# Altium footprint library header.PcbLib: 139 footprints (part 7 of 9)
Each footprint in its own frame and in the unit in brackets; x right, y up, seen from the top. Pads: shape width x height; smd on the part's side, far side on the other; paste and mask are expansions set on the pad; w line width, h text height; cw(c..) or ccw(c..) is an arc to the next point about the centre after c.
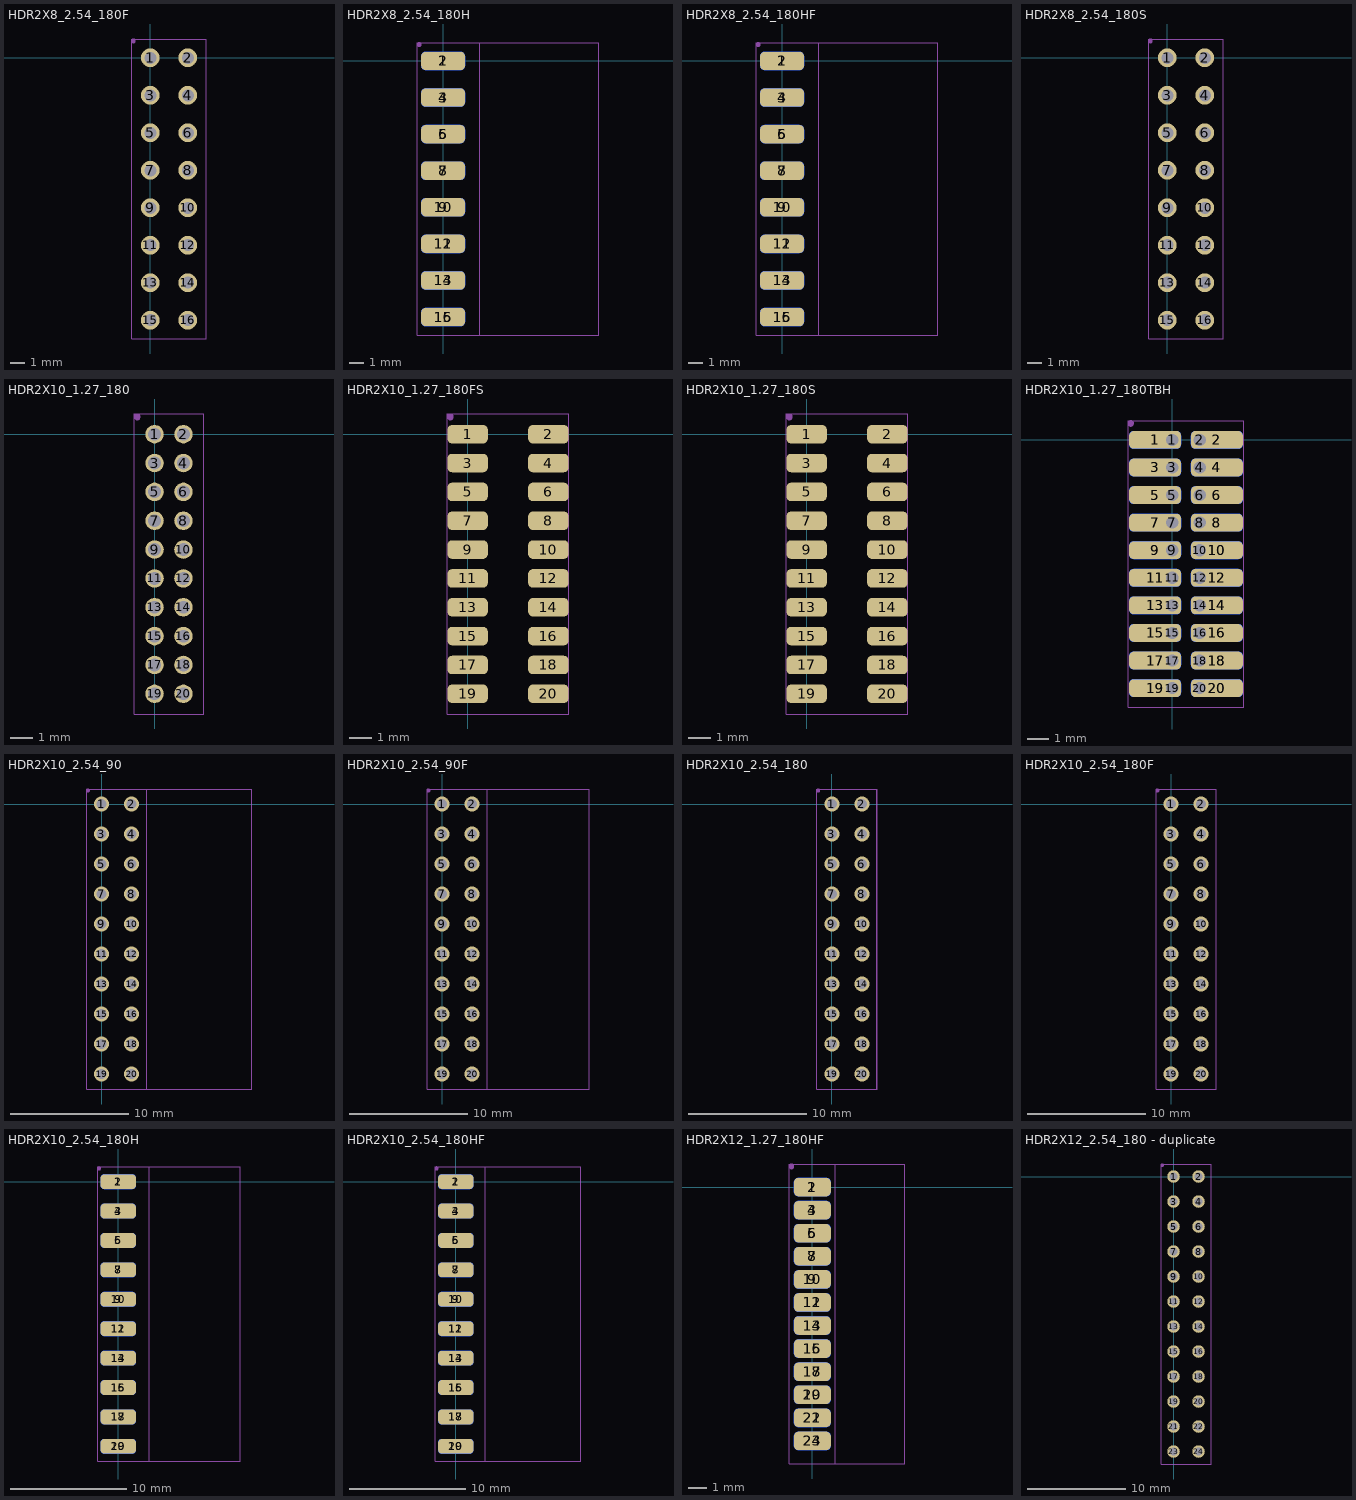
[diagram p6: the footprints below, top view; thin cyan lines are the x and y axes]

## HDR2X8_2.54_180F [mil]
height 169.29
pads (16):
  round 50 hole 32: 1(0,0) 2(100,0) 3(0,-100) 4(100,-100) 5(0,-200) 6(100,-200) 7(0,-300) 8(100,-300) 9(0,-400) 10(100,-400) 11(0,-500) 12(100,-500) 13(0,-600) 14(100,-600) 15(0,-700) 16(100,-700)
Mechanical 13:
  lines w2: -50,-750 -50,50 150,50 150,-750 -50,-750
Top Component (Mech14):
  circle w2: c-45,45 r5
  region: -45,40 -45.99,40 -47.83,40.76 -49.24,42.17 -50,44.01 -50,45 -50,45.99 -49.24,47.83 -47.83,49.24 -45.99,50 -45,50 -44.01,50 -42.17,49.24 -40.76,47.83 -40,45.99 -40,45 -40,44.01 -40.76,42.17 -42.17,40.76 -44.01,40
  lines w2: -50,-750 -50,50 150,50 150,-750 -50,-750
  text ".Designator" at 19,-370 h80
3D body "female_header_a-bl254-dg-g16d.stp": height 334.65, standoff -125.98, extent -48.42,-754.92 148.43,54.93

## HDR2X8_2.54_180H [mil]
height 169.29
pads (16):
  rrect50% 120x50 smd: 1(0,0) 3(0,-100) 5(0,-200) 7(0,-300) 9(0,-400) 11(0,-500) 13(0,-600) 15(0,-700)
  rrect50% 120x50 smd far side: 2(0,0) 4(0,-100) 6(0,-200) 8(0,-300) 10(0,-400) 12(0,-500) 14(0,-600) 16(0,-700)
Mechanical 13:
  lines w2: -70,-750 -70,50 425,50 425,-750 -70,-750
Top Component (Mech14):
  circle w2: c-65,45 r5
  region: -65,40 -65.99,40 -67.83,40.76 -69.24,42.17 -70,44.01 -70,45 -70,45.99 -69.24,47.83 -67.83,49.24 -65.99,50 -65,50 -64.01,50 -62.17,49.24 -60.76,47.83 -60,45.99 -60,45 -60,44.01 -60.76,42.17 -62.17,40.76 -64.01,40
  lines w2: -70,-750 100,-750 100,50 -70,50 -70,-750
  text ".Designator" at -26,-370 h80
Bottom Component (Mech15):
  lines w2: -70,-750 100,-750 100,50 -70,50 -70,-750
3D body "pin_header_awl254-dg-g16d.stp": height 78, standoff -122, extent -38.11,-749.99 414.65,50.01

## HDR2X8_2.54_180HF [mil]
height 169.29
pads (16):
  rrect50% 120x50 smd: 1(0,0) 3(0,-100) 5(0,-200) 7(0,-300) 9(0,-400) 11(0,-500) 13(0,-600) 15(0,-700)
  rrect50% 120x50 smd far side: 2(0,0) 4(0,-100) 6(0,-200) 8(0,-300) 10(0,-400) 12(0,-500) 14(0,-600) 16(0,-700)
Mechanical 13:
  lines w2: -70,-750 425,-750 425,50 -70,50 -70,-750
Top Component (Mech14):
  circle w2: c-65,45 r5
  region: -65,40 -65.99,40 -67.83,40.76 -69.24,42.17 -70,44.01 -70,45 -70,45.99 -69.24,47.83 -67.83,49.24 -65.99,50 -65,50 -64.01,50 -62.17,49.24 -60.76,47.83 -60,45.99 -60,45 -60,44.01 -60.76,42.17 -62.17,40.76 -64.01,40
  lines w2: -70,-750 -70,50 100,50 100,-750 -70,-750
  text ".Designator" at -31,-370 h80
Bottom Component (Mech15):
  lines w2: -70,-750 -70,50 100,50 100,-750 -70,-750
3D body "female_header_a-bl254-dg-g16d.stp": height 76.43, standoff -120.43, extent -35.98,-754.92 424.65,54.92

## HDR2X8_2.54_180S [mil]
height 169.29
pads (16):
  round 50 hole 32: 1(0,0) 2(100,0) 3(0,-100) 4(100,-100) 5(0,-200) 6(100,-200) 7(0,-300) 8(100,-300) 9(0,-400) 10(100,-400) 11(0,-500) 12(100,-500) 13(0,-600) 14(100,-600) 15(0,-700) 16(100,-700)
Mechanical 13:
  lines w2: -50,-750 150,-750 150,50 -50,50 -50,-750
Top Component (Mech14):
  circle w2: c-45,45 r5
  region: -45,40 -45.99,40 -47.83,40.76 -49.24,42.17 -50,44.01 -50,45 -50,45.99 -49.24,47.83 -47.83,49.24 -45.99,50 -45,50 -44.01,50 -42.17,49.24 -40.76,47.83 -40,45.99 -40,45 -40,44.01 -40.76,42.17 -42.17,40.76 -44.01,40
  lines w2: -50,-750 150,-750 150,50 -50,50 -50,-750
  text ".Designator" at 19,-370 h80
3D body "pin_header_a-sl254-dg-g16mp1.stp": height 334.71, standoff -48.82, extent -97.64,-750 197.64,50

## HDR2X10_1.27_180 [mil]
height 169.29
pads (20):
  round 32 hole 22: 1(0,0) 2(50,0) 3(0,-50) 4(50,-50) 5(0,-100) 6(50,-100) 7(0,-150) 8(50,-150) 9(0,-200) 10(50,-200) 11(0,-250) 12(50,-250) 13(0,-300) 14(50,-300) 15(0,-350) 16(50,-350) 17(0,-400) 18(50,-400) 19(0,-450) 20(50,-450)
Mechanical 13:
  lines w2: -35,-485 -35,35 85,35 85,-485 -35,-485
Top Component (Mech14):
  circle w2: c-30,30 r5
  region: -30,25 -30.99,25 -32.83,25.76 -34.24,27.17 -35,29.01 -35,30 -35,30.99 -34.24,32.83 -32.83,34.24 -30.99,35 -30,35 -29.01,35 -27.17,34.24 -25.76,32.83 -25,30.99 -25,30 -25,29.01 -25.76,27.17 -27.17,25.76 -29.01,25
  lines w2: -35,-485 85,-485 85,35 -35,35 -35,-485
  text ".Designator" at -1,-245 h80

## HDR2X10_1.27_180FS [mil]
height 169.29
pads (20):
  rrect50% 70x32 smd: 1(0,0) 2(140,0) 3(0,-50) 4(140,-50) 5(0,-100) 6(140,-100) 7(0,-150) 8(140,-150) 9(0,-200) 10(140,-200) 11(0,-250) 12(140,-250) 13(0,-300) 14(140,-300) 15(0,-350) 16(140,-350) 17(0,-400) 18(140,-400) 19(0,-450) 20(140,-450)
Mechanical 13:
  lines w2: -35,-485 -35,35 175,35 175,-485 -35,-485
Top Component (Mech14):
  circle w2: c-30,30 r5
  region: -30,25 -30.99,25 -32.83,25.76 -34.24,27.17 -35,29.01 -35,30 -35,30.99 -34.24,32.83 -32.83,34.24 -30.99,35 -30,35 -29.01,35 -27.17,34.24 -25.76,32.83 -25,30.99 -25,30 -25,29.01 -25.76,27.17 -27.17,25.76 -29.01,25
  lines w2: -35,-485 -35,35 175,35 175,-485 -35,-485
  text ".Designator" at 44,-245 h80
3D body "female_header_a-bl127-dg-g20mp1.stp": height 185.29, standoff 8.13, extent -20.54,-482.88 160.56,32.87

## HDR2X10_1.27_180S [mil]
height 169.29
pads (20):
  rrect50% 70x32 smd: 1(0,0) 2(140,0) 3(0,-50) 4(140,-50) 5(0,-100) 6(140,-100) 7(0,-150) 8(140,-150) 9(0,-200) 10(140,-200) 11(0,-250) 12(140,-250) 13(0,-300) 14(140,-300) 15(0,-350) 16(140,-350) 17(0,-400) 18(140,-400) 19(0,-450) 20(140,-450)
Mechanical 13:
  lines w2: -35,-485 175,-485 175,35 -35,35 -35,-485
Top Component (Mech14):
  circle w2: c-30,30 r5
  region: -30,25 -30.99,25 -32.83,25.76 -34.24,27.17 -35,29.01 -35,30 -35,30.99 -34.24,32.83 -32.83,34.24 -30.99,35 -30,35 -29.01,35 -27.17,34.24 -25.76,32.83 -25,30.99 -25,30 -25,29.01 -25.76,27.17 -27.17,25.76 -29.01,25
  lines w2: -35,-485 175,-485 175,35 -35,35 -35,-485
  text ".Designator" at 44,-245 h80
3D body "pin_header_a-sl127-dg-g20mp1.stp": height 252.13, standoff 0.25, extent -38.31,-475 178.31,25

## HDR2X10_1.27_180TBH [mil]
height 169.29
pads (60):
  rrect50% 94x32 smd: 1(-31,0) 2(81,0) 3(-31,-50) 4(81,-50) 5(-31,-100) 6(81,-100) 7(-31,-150) 8(81,-150) 9(-31,-200) 10(81,-200) 11(-31,-250) 12(81,-250) 13(-31,-300) 14(81,-300) 15(-31,-350) 16(81,-350) 17(-31,-400) 18(81,-400) 19(-31,-450) 20(81,-450)
  rrect50% 94x32 smd far side: 1(-31,0) 2(81,0) 3(-31,-50) 4(81,-50) 5(-31,-100) 6(81,-100) 7(-31,-150) 8(81,-150) 9(-31,-200) 10(81,-200) 11(-31,-250) 12(81,-250) 13(-31,-300) 14(81,-300) 15(-31,-350) 16(81,-350) 17(-31,-400) 18(81,-400) 19(-31,-450) 20(81,-450)
  round 32 hole 22: 1(0,0) 2(50,0) 3(0,-50) 4(50,-50) 5(0,-100) 6(50,-100) 7(0,-150) 8(50,-150) 9(0,-200) 10(50,-200) 11(0,-250) 12(50,-250) 13(0,-300) 14(50,-300) 15(0,-350) 16(50,-350) 17(0,-400) 18(50,-400) 19(0,-450) 20(50,-450)
Mechanical 13:
  lines w2: -80,-485 130,-485 130,35 -80,35 -80,-485
Top Component (Mech14):
  circle w2: c-75,30 r5
  region: -75,25 -75.99,25 -77.83,25.76 -79.24,27.17 -80,29.01 -80,30 -80,30.99 -79.24,32.83 -77.83,34.24 -75.99,35 -75,35 -74.01,35 -72.17,34.24 -70.76,32.83 -70,30.99 -70,30 -70,29.01 -70.76,27.17 -72.17,25.76 -74.01,25
  lines w2: -80,-485 -80,35 130,35 130,-485 -80,-485
  text ".Designator" at -1,-245 h80

## HDR2X10_2.54_90 [mil]
height 169.29
pads (20):
  round 50 hole 32: 1(0,0) 2(100,0) 3(0,-100) 4(100,-100) 5(0,-200) 6(100,-200) 7(0,-300) 8(100,-300) 9(0,-400) 10(100,-400) 11(0,-500) 12(100,-500) 13(0,-600) 14(100,-600) 15(0,-700) 16(100,-700) 17(0,-800) 18(100,-800) 19(0,-900) 20(100,-900)
Mechanical 13:
  lines w2: -50,-950 500,-950 500,50 -50,50 -50,-950
Top Component (Mech14):
  circle w2: c-45,45 r5
  region: -45,40 -45.99,40 -47.83,40.76 -49.24,42.17 -50,44.01 -50,45 -50,45.99 -49.24,47.83 -47.83,49.24 -45.99,50 -45,50 -44.01,50 -42.17,49.24 -40.76,47.83 -40,45.99 -40,45 -40,44.01 -40.76,42.17 -42.17,40.76 -44.01,40
  lines w2: -50,-950 -50,50 150,50 150,-950 -50,-950
  text ".Designator" at 19,-470 h80
3D body "pin_header_awl254-da-g20d.stp": height 198.43, standoff -116.54, extent -12.44,-950 494.65,50

## HDR2X10_2.54_90F [mil]
height 169.29
pads (20):
  round 50 hole 32: 1(0,0) 2(100,0) 3(0,-100) 4(100,-100) 5(0,-200) 6(100,-200) 7(0,-300) 8(100,-300) 9(0,-400) 10(100,-400) 11(0,-500) 12(100,-500) 13(0,-600) 14(100,-600) 15(0,-700) 16(100,-700) 17(0,-800) 18(100,-800) 19(0,-900) 20(100,-900)
Mechanical 13:
  lines w2: -50,-950 490,-950 490,50 -50,50 -50,-950
Top Component (Mech14):
  circle w2: c-45,45 r5
  region: -45,40 -45.99,40 -47.83,40.76 -49.24,42.17 -50,44.01 -50,45 -50,45.99 -49.24,47.83 -47.83,49.24 -45.99,50 -45,50 -44.01,50 -42.17,49.24 -40.76,47.83 -40,45.99 -40,45 -40,44.01 -40.76,42.17 -42.17,40.76 -44.01,40
  lines w2: -50,-950 150,-950 150,50 -50,50 -50,-950
  text ".Designator" at 19,-470 h80
3D body "female_header_a-bl254-da-g20d.stp": height 198.43, standoff -124.41, extent -10,-954.92 486.06,54.92

## HDR2X10_2.54_180 [mil]
height 169.29
pads (20):
  round 50 hole 32: 1(0,0) 2(100,0) 3(0,-100) 4(100,-100) 5(0,-200) 6(100,-200) 7(0,-300) 8(100,-300) 9(0,-400) 10(100,-400) 11(0,-500) 12(100,-500) 13(0,-600) 14(100,-600) 15(0,-700) 16(100,-700) 17(0,-800) 18(100,-800) 19(0,-900) 20(100,-900)
Mechanical 13:
  lines w2: -50,-950 -50,50 150,50 150,-950 -50,-950
Top Component (Mech14):
  circle w2: c-45,45 r5
  region: -45,40 -45.99,40 -47.83,40.76 -49.24,42.17 -50,44.01 -50,45 -50,45.99 -49.24,47.83 -47.83,49.24 -45.99,50 -45,50 -44.01,50 -42.17,49.24 -40.76,47.83 -40,45.99 -40,45 -40,44.01 -40.76,42.17 -42.17,40.76 -44.01,40
  lines w2: -50,-950 -50,50 150,50 150,-950 -50,-950
  text ".Designator" at 19,-470 h80
3D body "pin_header_awl254-dg-g20d.stp": height 334.65, standoff -118.11, extent -50,-950 150,50

## HDR2X10_2.54_180F [mil]
height 169.29
pads (20):
  round 50 hole 32: 1(0,0) 2(100,0) 3(0,-100) 4(100,-100) 5(0,-200) 6(100,-200) 7(0,-300) 8(100,-300) 9(0,-400) 10(100,-400) 11(0,-500) 12(100,-500) 13(0,-600) 14(100,-600) 15(0,-700) 16(100,-700) 17(0,-800) 18(100,-800) 19(0,-900) 20(100,-900)
Mechanical 13:
  lines w2: -50,-950 150,-950 150,50 -50,50 -50,-950
Top Component (Mech14):
  circle w2: c-45,45 r5
  region: -45,40 -45.99,40 -47.83,40.76 -49.24,42.17 -50,44.01 -50,45 -50,45.99 -49.24,47.83 -47.83,49.24 -45.99,50 -45,50 -44.01,50 -42.17,49.24 -40.76,47.83 -40,45.99 -40,45 -40,44.01 -40.76,42.17 -42.17,40.76 -44.01,40
  lines w2: -50,-950 150,-950 150,50 -50,50 -50,-950
  text ".Designator" at 19,-470 h80
3D body "female_header_a-bl254-dg-g20d.stp": height 334.65, standoff -125.98, extent -48.42,-954.92 148.43,54.92

## HDR2X10_2.54_180H [mil]
height 169.29
pads (20):
  rrect50% 120x50 smd: 1(0,0) 3(0,-100) 5(0,-200) 7(0,-300) 9(0,-400) 11(0,-500) 13(0,-600) 15(0,-700) 17(0,-800) 19(0,-900)
  rrect50% 120x50 smd far side: 2(0,0) 4(0,-100) 6(0,-200) 8(0,-300) 10(0,-400) 12(0,-500) 14(0,-600) 16(0,-700) 18(0,-800) 20(0,-900)
Mechanical 13:
  lines w2: -70,-950 -70,50 415,50 415,-950 -70,-950
Top Component (Mech14):
  circle w2: c-65,45 r5
  region: -65,40 -65.99,40 -67.83,40.76 -69.24,42.17 -70,44.01 -70,45 -70,45.99 -69.24,47.83 -67.83,49.24 -65.99,50 -65,50 -64.01,50 -62.17,49.24 -60.76,47.83 -60,45.99 -60,45 -60,44.01 -60.76,42.17 -62.17,40.76 -64.01,40
  lines w2: -70,-950 -70,50 105,50 105,-950 -70,-950
  text ".Designator" at -31,-470 h80
Bottom Component (Mech15):
  lines w2: -70,-950 105,-950 105,50 -70,50 -70,-950
3D body "pin_header_awl254-dg-g20d.stp": height 100, standoff -100, extent -37.76,-950 415,50

## HDR2X10_2.54_180HF [mil]
height 169.29
pads (20):
  rrect50% 120x50 smd: 1(0,0) 3(0,-100) 5(0,-200) 7(0,-300) 9(0,-400) 11(0,-500) 13(0,-600) 15(0,-700) 17(0,-800) 19(0,-900)
  rrect50% 120x50 smd far side: 2(0,0) 4(0,-100) 6(0,-200) 8(0,-300) 10(0,-400) 12(0,-500) 14(0,-600) 16(0,-700) 18(0,-800) 20(0,-900)
Mechanical 13:
  lines w2: -70,-950 -70,50 425,50 425,-950 -70,-950
Top Component (Mech14):
  circle w2: c-65,45 r5
  region: -65,40 -65.99,40 -67.83,40.76 -69.24,42.17 -70,44.01 -70,45 -70,45.99 -69.24,47.83 -67.83,49.24 -65.99,50 -65,50 -64.01,50 -62.17,49.24 -60.76,47.83 -60,45.99 -60,45 -60,44.01 -60.76,42.17 -62.17,40.76 -64.01,40
  lines w2: -70,-950 -70,50 100,50 100,-950 -70,-950
  text ".Designator" at -31,-470 h80
Bottom Component (Mech15):
  lines w2: -70,-950 100,-950 100,50 -70,50 -70,-950
3D body "female_header_a-bl254-dg-g20d.stp": height 76.43, standoff -120.43, extent -40.98,-954.92 419.65,54.92

## HDR2X12_1.27_180HF [mil]
height 169.29
pads (24):
  rrect50% 80x40 smd: 1(0,0) 3(0,-50) 5(0,-100) 7(0,-150) 9(0,-200) 11(0,-250) 13(0,-300) 15(0,-350) 17(0,-400) 19(0,-450) 21(0,-500) 23(0,-550)
  rrect50% 80x40 smd far side: 2(0,0) 4(0,-50) 6(0,-100) 8(0,-150) 10(0,-200) 12(0,-250) 14(0,-300) 16(0,-350) 18(0,-400) 20(0,-450) 22(0,-500) 24(0,-550)
Mechanical 13:
  lines w2: -50,-600 -50,50 200,50 200,-600 -50,-600
Top Component (Mech14):
  circle w2: c-45,45 r5
  region: -45,40 -45.99,40 -47.83,40.76 -49.24,42.17 -50,44.01 -50,45 -50,45.99 -49.24,47.83 -47.83,49.24 -45.99,50 -45,50 -44.01,50 -42.17,49.24 -40.76,47.83 -40,45.99 -40,45 -40,44.01 -40.76,42.17 -42.17,40.76 -44.01,40
  lines w2: -50,-600 -50,50 50,50 50,-600 -50,-600
  text ".Designator" at -31,-295 h80
3D body "female_header_a-bl127-dg-g24d.stp": height 39.02, standoff -83.02, extent -28.34,-582.88 200,32.87

## HDR2X12_2.54_180 - duplicate [mil]
height 169.29
pads (24):
  round 50 hole 32: 1(0,0) 2(100,0) 3(0,-100) 4(100,-100) 5(0,-200) 6(100,-200) 7(0,-300) 8(100,-300) 9(0,-400) 10(100,-400) 11(0,-500) 12(100,-500) 13(0,-600) 14(100,-600) 15(0,-700) 16(100,-700) 17(0,-800) 18(100,-800) 19(0,-900) 20(100,-900) 21(0,-1000) 22(100,-1000) 23(0,-1100) 24(100,-1100)
Mechanical 13:
  lines w2: -50,-1150 -50,50 150,50 150,-1150 -50,-1150
Top Component (Mech14):
  circle w2: c-45,45 r5
  region: -45,40 -45.99,40 -47.83,40.76 -49.24,42.17 -50,44.01 -50,45 -50,45.99 -49.24,47.83 -47.83,49.24 -45.99,50 -45,50 -44.01,50 -42.17,49.24 -40.76,47.83 -40,45.99 -40,45 -40,44.01 -40.76,42.17 -42.17,40.76 -44.01,40
  lines w2: -50,-1150 150,-1150 150,50 -50,50 -50,-1150
  text ".Designator" at 19,-570 h80
3D body "pin_header_awl254-dg-g24d.stp": height 334.65, standoff -118.11, extent -50,-1149.99 150,50.01